# Altium schematic symbol library TPS63001DRCR.SchLib: 1 symbol
Pins are listed as number, name and electrical type; pins without a type are passive.

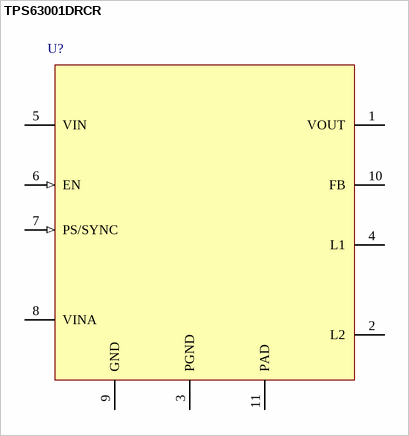
[diagram p0: symbol TPS63001DRCR]

## TPS63001DRCR
designator U?
Buck-boost converter, fixed 3.3V output, 1.8-5.5V input, 1.8A switches, VSON-10
pins: 1 VOUT, 2 L2, 3 PGND (power), 4 L1, 5 VIN (power), 6 EN (in), 7 PS/SYNC (in), 8 VINA (power), 9 GND (power), 10 FB, 11 PAD (power)